# Altium footprint library STDC14.PcbLib: 2 footprints
Each footprint in its own frame and in the unit in brackets; x right, y up, seen from the top. Pads: shape width x height; smd on the part's side, far side on the other; paste and mask are expansions set on the pad; w line width, h text height; cw(c..) or ccw(c..) is an arc to the next point about the centre after c.
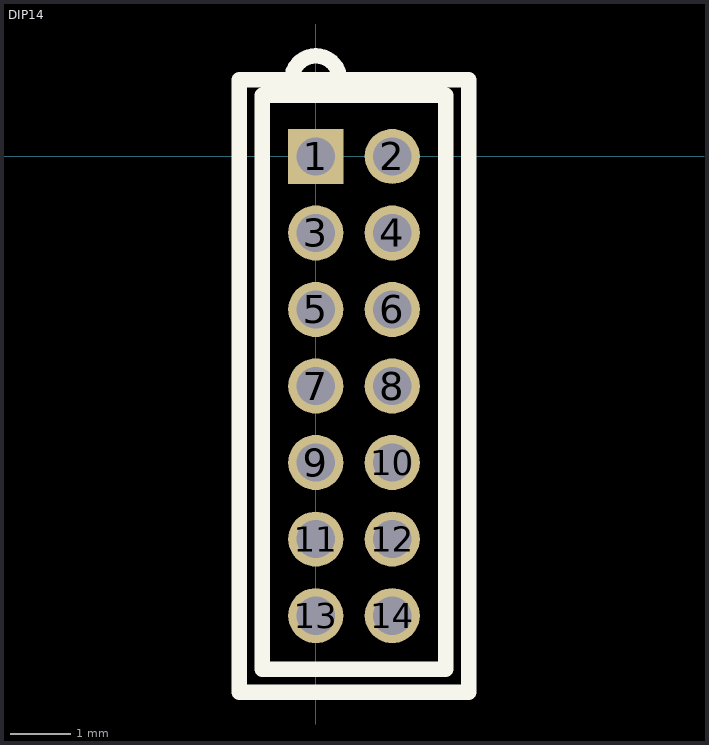
[diagram p0: the footprints below, top view; thin cyan lines are the x and y axes]

## DIP14 [mil]
pads (14):
  rect 36x36 hole 25: 1(0,0)
  round 36 hole 25: 2(50,0) 3(0,-50) 4(50,-50) 5(0,-100) 6(50,-100) 7(0,-150) 8(50,-150) 9(0,-200) 10(50,-200) 11(0,-250) 12(50,-250) 13(0,-300) 14(50,-300)
Top Overlay:
  lines w10: -12.5,40.5 cw(c0,50) 12.5,40.5 ; 12.5,40 85,40 85,-335 -35,-335 -35,40 37.5,40 ; -50,-350 -50,50 100,50 100,-350 -50,-350
Bottom Overlay:
  lines w10: -50,-350 -50,50 100,50 100,-350 -50,-350

## PCBComponent_1 [mil]